# Altium schematic symbol library 476-4.SchLib: 1 symbol
Pins are listed as number, name and electrical type; pins without a type are passive.

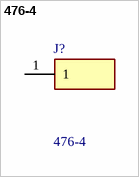
[diagram p0: symbol 476-4]

## 476-4
designator J?
Banana Jack Connector Miniature Solder; Manufacturer_Name: Keystone Electronics; Geometry.Height: 6.66mm; Mouser Part Number: 534-476-4; Mouser Price/Stock: https://www.mouser.co.uk/ProductDetail/Keystone-Electronics/476-4?qs=w4ABFRoM%2FL8IE7UmBO5PGw%3D%3D; Manufacturer_Part_Number: 476-4; Datasheet Link: https://www.digikey.com/en/products/detail/keystone-electronics/476-4/318477
footprint 4764
pins: 1